# Altium schematic symbol library 5V电源肖特基二极管_B560C-13-F.SCHLIB: 1 symbol
Pins are listed as number, name and electrical type; pins without a type are passive.

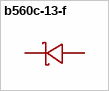
[diagram p0: symbol b560c-13-f]

## b560c-13-f
designator D??  (value not drawn)
二极管配置:1个独立式;正向压降(Vf):700mV@5A;直流反向耐压(Vr):60V;整流电流:5A;; Manufacturer: DIODES(美台); AddInBom: yes; ModelId: 01527a4a3c424c5dbce25e8907f4d20c; ModelName: SMC_L7.1-W6.2-LS8.1-RD; ModelTransform: 314.96,236.22,0,0,0,0,0,0,0; Diode Configuration: 1个独立式; Voltage - DC Reverse(Vr): 60V; Current - Rectified: 5A; Reverse Leakage Current (Ir): 500uA@60V; Operating Junction Temperature Range: -55℃~+150℃; Non-Repetitive Peak Forward Surge Current: 100A; Symbol: B560C-13-F; LCSC Part Name: 电压:60V 电流:5A; SupplierPart: C85100; ManufacturerPart: B560C-13-F; Supplier Footprint: SMC(DO-214AB); JLCPCB Part Class: Extended Part; Datasheet: https://item.szlcsc.com/datasheet/B560C-13-F/86272.html; Supplier: LCSC; ConvertToPcb: yes; FootprintName: SMC_L7.1-W6.2-LS8.1-RD; Voltage - Forward(Vf@If): 700mV@5A
footprint SMC_L7.1-W6.2-LS8.1-RD
pins: 1 K, 2 A